# Altium footprint library Robot.PcbLib: 113 footprints (part 6 of 8)
Each footprint in its own frame and in the unit in brackets; x right, y up, seen from the top. Pads: shape width x height; smd on the part's side, far side on the other; paste and mask are expansions set on the pad; w line width, h text height; cw(c..) or ccw(c..) is an arc to the next point about the centre after c.
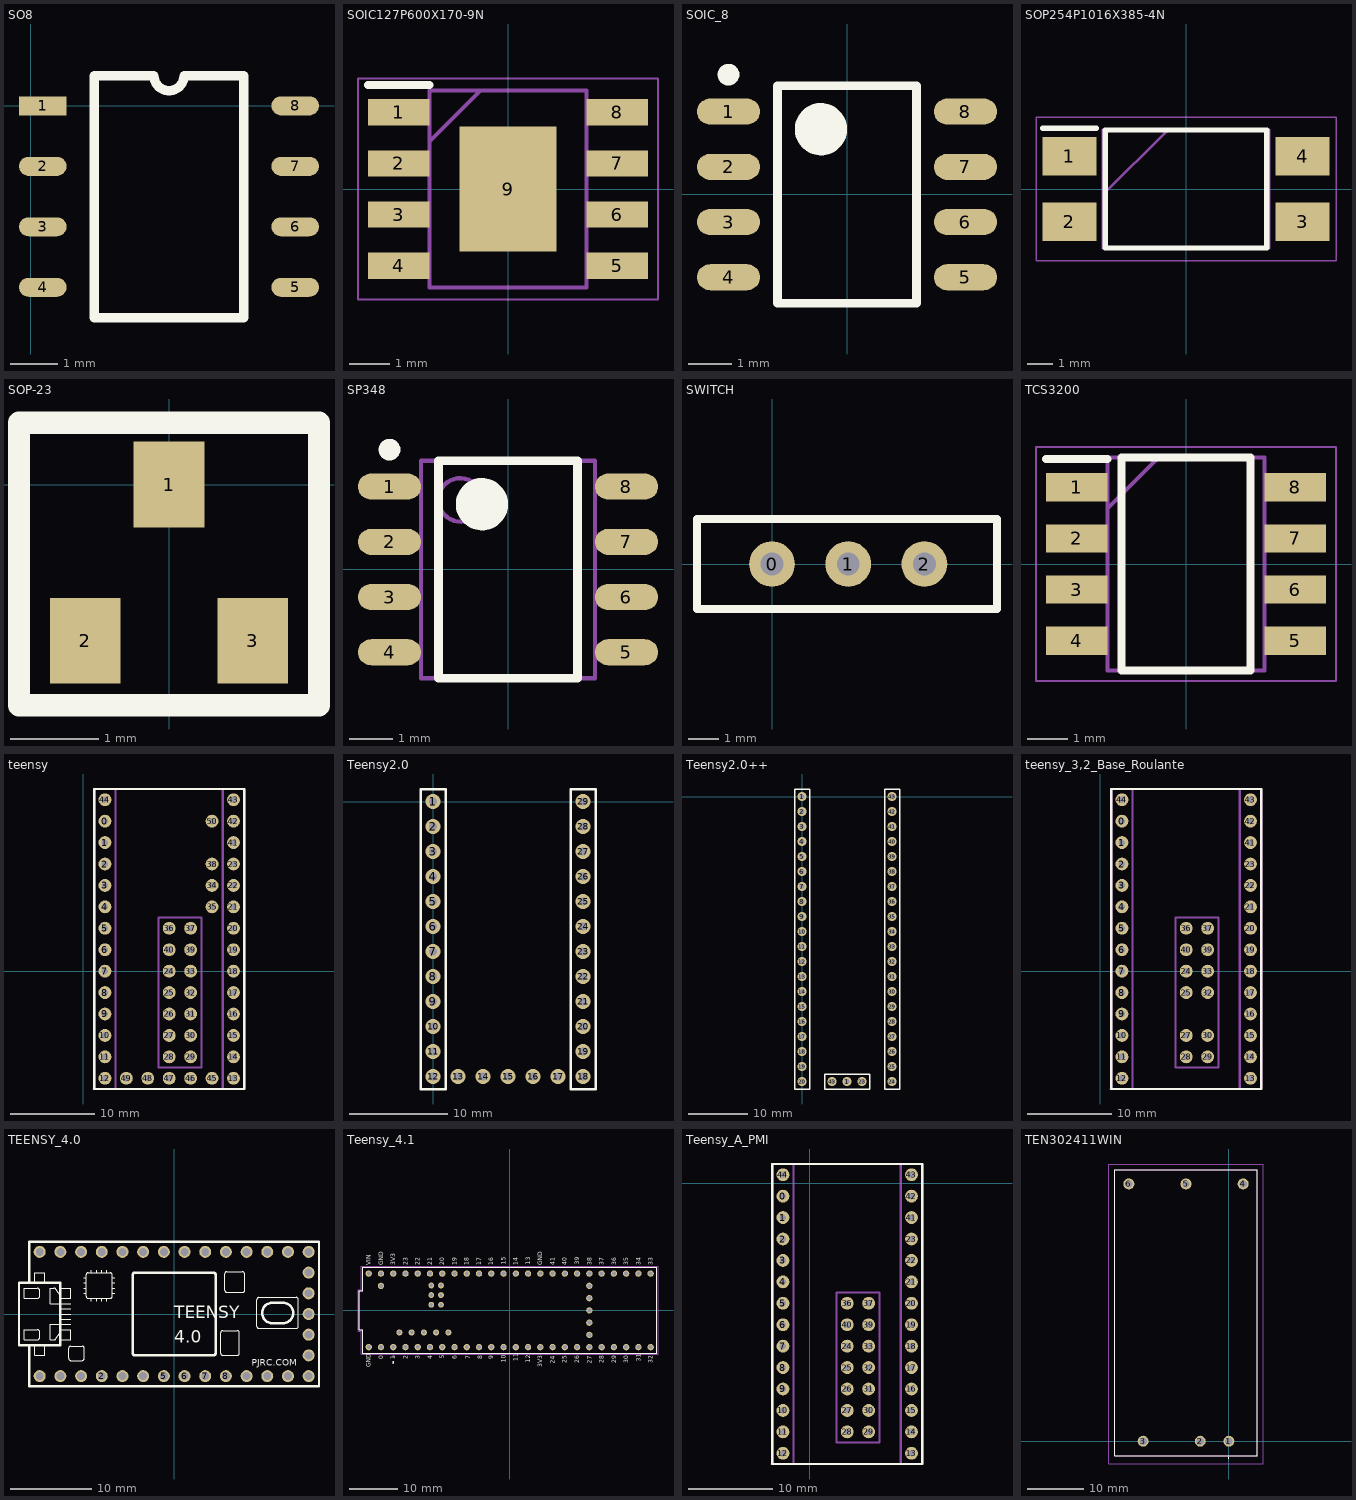
[diagram p5: the footprints below, top view; thin cyan lines are the x and y axes]

## SO8 [mm]
pads (8):
  rect 1x0.4 smd: 1(0.25,0)
  oval 1x0.4 smd: 2(0.25,-1.27) 3(0.25,-2.54) 4(0.25,-3.81) 5(5.55,-3.81) 6(5.55,-2.54) 7(5.55,-1.27) 8(5.55,0)
Top Overlay:
  lines w0.2: 1.335,-4.445 1.335,0.635 2.582,0.635 ccw(c2.9,0.635) 3.217,0.635 4.465,0.635 4.465,-4.445 1.335,-4.445

## SOIC127P600X170-9N [mm]
pads (9):
  rect 1.525x0.65 smd: 1(-2.712,1.905) 2(-2.712,0.635) 3(-2.712,-0.635) 4(-2.712,-1.905) 5(2.712,-1.905) 6(2.712,-0.635) 7(2.712,0.635) 8(2.712,1.905)
  rect 2.4x3.1 smd: 9(0,0)
Top Overlay:
  lines w0.2: -3.475,2.58 -1.95,2.58
Mechanical 13:
  lines w0.1: -1.95,1.18 -0.68,2.45 ; -1.95,-2.45 -1.95,2.45 1.95,2.45 1.95,-2.45 -1.95,-2.45
Mechanical 15:
  lines w0.05: -3.725,-2.75 -3.725,2.75 3.725,2.75 3.725,-2.75 -3.725,-2.75
3D body "DRV8871DDA.stp": height 1.57, standoff 0, extent -3,-2.45 3,2.45

## SOIC_8 [mm] "SOIC, 8-Leads, Body 4,90x3,90mm, Pitch 1,27mm, IPC Medium Density"
height 1.75
pads (8):
  oval 1.45x0.6 smd: 1(-2.725,1.905) 2(-2.725,0.635) 3(-2.725,-0.635) 4(-2.725,-1.905) 5(2.725,-1.905) 6(2.725,-0.635) 7(2.725,0.635) 8(2.725,1.905)
Top Overlay:
  circle w0.25: c-2.725,2.755 r0.125
  circle w0.6: c-0.6,1.5 r0.3
  lines w0.2: -1.6,-2.5 -1.6,2.5 1.6,2.5 1.6,-2.5 -1.6,-2.5
3D body: height 1.75, standoff 0.1, extent -2,-2.5 2,2.5

## SOP254P1016X385-4N [mm]
pads (4):
  rect 2.1x1.5 smd: 1(-4.55,1.27) 2(-4.55,-1.27) 3(4.55,-1.27) 4(4.55,1.27)
Top Overlay:
  lines w0.2: -5.6,2.37 -3.5,2.37 ; -3.15,-2.3 -3.15,2.3 3.15,2.3 3.15,-2.3 -3.15,-2.3
Mechanical 13:
  lines w0.1: -3.25,-0.24 -0.71,2.3 ; -3.25,-2.3 -3.25,2.3 3.25,2.3 3.25,-2.3 -3.25,-2.3
Mechanical 15:
  lines w0.05: -5.85,-2.8 -5.85,2.8 5.85,2.8 5.85,-2.8 -5.85,-2.8
3D body "FOD817S.stp": height 3.85, standoff 0, extent -5.08,-2.3 5.08,2.3

## SOP-23 [mm]
pads (3):
  rect 0.802x0.972 smd: 1(0,0) 2(-0.95,-1.77) 3(0.95,-1.77)
Top Overlay:
  lines w0.254: -1.7,-2.5 1.7,-2.5 1.7,0.7 -0.2,0.7 -1.7,0.7 -1.7,-2.5

## SP348 [mm] "SOIC, SP348 Transceiver"
height 1.75
pads (8):
  oval 1.45x0.6 smd: 1(-2.725,1.905) 2(-2.725,0.635) 3(-2.725,-0.635) 4(-2.725,-1.905) 5(2.725,-1.905) 6(2.725,-0.635) 7(2.725,0.635) 8(2.725,1.905)
Top Overlay:
  circle w0.6: c-0.6,1.5 r0.3
  circle w0.25: c-2.725,2.755 r0.125
  lines w0.2: -1.6,-2.5 1.6,-2.5 1.6,2.5 -1.6,2.5 -1.6,-2.5
Mechanical 13:
  circle w0.1: c-1.1,1.6 r0.5
  lines w0.1: -2,-2.5 2,-2.5 2,2.5 -2,2.5 -2,-2.5
3D body: height 1.75, standoff 0.1, extent -2,-2.5 2,2.5

## SWITCH [mil] "2 pos switch,  09.03290.01"
height 314.96
pads (3):
  round 60 hole 30: 0(0,0) 1(100,0) 2(200,0)
Top Overlay:
  lines w10: -98.43,-59.06 -98.43,59.06 295.28,59.06 295.28,-59.06 -98.43,-59.06
3D body: height 291.34, standoff 208.66, extent 0,-59.06 78.74,59.06
3D body: height 177.17, standoff 0, extent -98.43,-59.06 295.28,59.06
3D body: height 208.66, standoff 177.17, extent -98.43,-59.06 177.17,59.06

## TCS3200 [mm] "High-Resolution Conversion of Light Intensity to Frequency  Programmable Color and Full-Scale Output Frequency  Communicates Directly With a Microcontroller  Single-Supply Operation (2.7 V to 5.5 V)  Power Down Feature  Nonlinearity Error Typically 0.2% at 50 kHz"
pads (8):
  rect 1.525x0.7 smd: 1(-2.712,1.905) 2(-2.712,0.635) 3(-2.712,-0.635) 4(-2.712,-1.905) 5(2.712,-1.905) 6(2.712,-0.635) 7(2.712,0.635) 8(2.712,1.905)
Top Overlay:
  lines w0.2: -3.475,2.605 -1.95,2.605 ; -1.6,-2.65 -1.6,2.65 1.6,2.65 1.6,-2.65 -1.6,-2.65
Mechanical 15:
  lines w0.1: -1.95,1.38 -0.68,2.65 ; -1.95,-2.65 -1.95,2.65 1.95,2.65 1.95,-2.65 -1.95,-2.65
Mechanical 20:
  lines w0.05: -3.725,-2.9 -3.725,2.9 3.725,2.9 3.725,-2.9 -3.725,-2.9

## teensy [mil] "Teensy 3.2"
pads (51):
  round 60 hole 30: 0(100,700) 1(100,600) 2(100,500) 3(100,400) 4(100,300) 5(100,200) 6(100,100) 7(100,0) 8(100,-100) 9(100,-200) 10(100,-300) 11(100,-400) 12(100,-500) 13(700,-500) 14(700,-400) 15(700,-300) 16(700,-200) 17(700,-100) 18(700,0) 19(700,100) 20(700,200) 21(700,300) 22(700,400) 23(700,500) 24(400,0) 25(400,-100) 26(400,-200) 27(400,-300) 28(400,-400) 29(500,-400) 30(500,-300) 31(500,-200) 32(500,-100) 33(500,0) 34(600,400) 35(600,300) 36(400,200) 37(500,200) 38(600,500) 39(500,100) 40(400,100) 41(700,600) 42(700,700) 43(700,800) 44(100,800) 45(600,-500) 46(500,-500) 47(400,-500) 48(300,-500) 49(200,-500) 50(600,700)
Top Overlay:
  lines w10: 50,-550 50,850 750,850 750,-550 50,-550
Mechanical 1:
  lines w10: 48.14,-550 50,-548.14 50,850 150,850 150,-550 48.14,-550 ; 350,-450 350,250 550,250 550,-450 350,-450 ; 650,-550 650,850 750,850 750,-550 650,-550
3D body "Teensy_3-2.stp": height 504.76, standoff 253.15, extent 48.14,-550 751.86,906.68
3D body: height 331.89, standoff 0, extent 650.02,-549.98 749.98,849.98
3D body: height 331.89, standoff 0, extent 48.09,-550.02 150.02,850.02
3D body: height 331.89, standoff 0, extent 350.02,-449.98 549.98,249.98

## Teensy2.0 [mil] "Teensy2.0 with minimal"
pads (29):
  round 60 hole 31.5: 1(0,0) 2(0,-100) 3(0,-200) 4(0,-300) 5(0,-400) 6(0,-500) 7(0,-600) 8(0,-700) 9(0,-800) 10(0,-900) 11(0,-1000) 12(0,-1100) 13(100,-1100) 14(200,-1100) 15(300,-1100) 16(400,-1100) 17(500,-1100) 18(600,-1100) 19(600,-1000) 20(600,-900) 21(600,-800) 22(600,-700) 23(600,-600) 24(600,-500) 25(600,-400) 26(600,-300) 27(600,-200) 28(600,-100) 29(600,0)
Top Overlay:
  lines w10: -50,-1150 50,-1150 50,50 -50,50 -50,-1150 ; 550,-1150 550,50 650,50 650,-1150 550,-1150
3D body: height 255.91, standoff 0, extent -50,-1150 50,50
3D body: height 255.91, standoff 0, extent 550,-1150 650,50
3D body: height 255.91, standoff 0, extent 50,-1150 550,-1050

## Teensy2.0++ [mil]
pads (43):
  round 60 hole 31.5: 1(0,0) 1(300,-1900) 2(0,-100) 3(0,-200) 4(0,-300) 5(0,-400) 6(0,-500) 7(0,-600) 8(0,-700) 9(0,-800) 10(0,-900) 11(0,-1000) 12(0,-1100) 13(0,-1200) 14(0,-1300) 15(0,-1400) 16(0,-1500) 17(0,-1600) 18(0,-1700) 19(0,-1800) 20(0,-1900) 23(400,-1900) 24(600,-1900) 25(600,-1800) 26(600,-1700) 27(600,-1600) 28(600,-1500) 29(600,-1400) 30(600,-1300) 31(600,-1200) 32(600,-1100) 33(600,-1000) 34(600,-900) 35(600,-800) 36(600,-700) 37(600,-600) 38(600,-500) 39(600,-400) 40(600,-300) 41(600,-200) 42(600,-100) 43(200,-1900) 43(600,0)
Top Overlay:
  lines w10: -50,-1950 50,-1950 50,50 -50,50 -50,-1950 ; 150,-1950 150,-1850 450,-1850 450,-1950 150,-1950 ; 550,-1950 550,50 650,50 650,-1950 550,-1950
3D body: height 255.91, standoff 0, extent 150,-1950 450,-1850
3D body: height 255.91, standoff 0, extent 550,-1950 650,50
3D body: height 255.91, standoff 0, extent -50,-1950 50,50
3D body "Teensy++2.0.STEP": height 572.84, standoff 31.5, extent -50,-1951.97 650,51.97

## teensy_3,2_Base_Roulante [mil] "Teensy 3.2"
pads (40):
  round 60 hole 30: 0(100,700) 1(100,600) 2(100,500) 3(100,400) 4(100,300) 5(100,200) 6(100,100) 7(100,0) 8(100,-100) 9(100,-200) 10(100,-300) 11(100,-400) 12(100,-500) 13(700,-500) 14(700,-400) 15(700,-300) 16(700,-200) 17(700,-100) 18(700,0) 19(700,100) 20(700,200) 21(700,300) 22(700,400) 23(700,500) 24(400,0) 25(400,-100) 27(400,-300) 28(400,-400) 29(500,-400) 30(500,-300) 32(500,-100) 33(500,0) 36(400,200) 37(500,200) 39(500,100) 40(400,100) 41(700,600) 42(700,700) 43(700,800) 44(100,800)
Top Overlay:
  lines w10: 50,-550 50,850 750,850 750,-550 50,-550
Mechanical 1:
  lines w10: 48.14,-550 50,-548.14 50,850 150,850 150,-550 48.14,-550 ; 350,-450 350,250 550,250 550,-450 350,-450 ; 650,-550 650,850 750,850 750,-550 650,-550
3D body "Teensy_3-2.stp": height 504.76, standoff 253.15, extent 48.14,-550 751.86,906.68
3D body: height 331.89, standoff 0, extent 650.02,-549.98 749.98,849.98
3D body: height 331.89, standoff 0, extent 48.09,-550.02 150.02,850.02
3D body: height 331.89, standoff 0, extent 350.02,-449.98 549.98,249.98

## TEENSY_4.0 [mil]
pads (33):
  round 58 hole 38: 0/RX(-550,-300) 1/TX(-450,-300) 2(-350,-300) 3/CANTX(-250,-300) 3V3_LN(650,-100) 3V3_LO(-450,300) 4/CANRX(-150,-300) 5(-50,-300) 6(50,-300) 7(150,-300) 8(250,-300) 9/CS(350,-300) 10/CS(450,-300) 11/MOSI(550,-300) 12/MISO(650,-300) 13/SCK(650,300) 14/A0(550,300) 15/A1(450,300) 16/A2(350,300) 17/A3(250,300) 18/A4/SDA(150,300) 19/A5/SCL(50,300) 20/A6(-50,300) 21/A7(-150,300) 22/A8(-250,300) 23/A9(-350,300) GND(-650,-300) GND2(-550,300) GND3(650,0) ON/OFF(650,200) PROG(650,100) VBAT\(650,-200) VIN(-650,300)
Top Overlay:
  drawing of 151 lines, arcs and shapes, not listed
  text "TEENSY" at 1.25,-20 h60
  text "4.0" at 1.25,-140 h60
  text "PJRC.COM" at 375,-250 h32
3D body "step_temp.STEP": height 172.44, standoff -47.24, extent -727.56,-350 700,350

## Teensy_4.1 [mm]
height 4.07
pads (65):
  round 1.308 hole 0.8: 0(-26.67,-7.62) 1(-24.13,-7.62) 2(-21.59,-7.62) 3(-19.05,-7.62) 3.3V_1(6.35,-7.62) 3.3V_2(-24.13,7.62) 3.3V_3(16.51,-2.54) 4(-16.51,-7.62) 5(-13.97,-7.62) 6(-11.43,-7.62) 7(-8.89,-7.62) 8(-6.35,-7.62) 9(-3.81,-7.62) 10(-1.27,-7.62) 11(1.27,-7.62) 12(3.81,-7.62) 13(3.81,7.62) 14(1.27,7.62) 15(-1.27,7.62) 16(-3.81,7.62) 17(-6.35,7.62) 18(-8.89,7.62) 19(-11.43,7.62) 20(-13.97,7.62) 21(-16.51,7.62) 22(-19.05,7.62) 23(-21.59,7.62) 24(8.89,-7.62) 25(11.43,-7.62) 26(13.97,-7.62) 27(16.51,-7.62) 28(19.05,-7.62) 29(21.59,-7.62) 30(24.13,-7.62) 31(26.67,-7.62) 32(29.21,-7.62) 33(29.21,7.62) 34(26.67,7.62) 35(24.13,7.62) 36(21.59,7.62) 37(19.05,7.62) 38(16.51,7.62) 39(13.97,7.62) 40(11.43,7.62) 41(8.89,7.62) GND1(-29.21,-7.62) GND2(6.35,7.62) GND3(-26.67,7.62) GND4(16.51,0) ON/OFF(16.51,5.08) PROGRAM(16.51,2.54) VBAT(16.51,-5.08) VIN(-29.21,7.62) VUSB(-26.67,5.08)
  round 1.258 hole 0.75: 5V(-22.86,-4.57) D+(-17.78,-4.57) D-(-20.32,-4.57) USB_GND1(-15.24,-4.57) USB_GND2(-12.7,-4.57)
  round 1.208 hole 0.7: GND5(-14.24,3.17) LED(-16.24,3.17) RX+(-16.24,5.17) RX-(-14.24,5.17) TX+(-14.24,1.17) TX-(-16.24,1.17)
Top Overlay:
  circle w0.25: c-24.13,-10.795 r0.125
  lines w0.127: -31.18,-4.03 -30.48,-4.03 -30.48,-8.89 30.48,-8.89 30.48,8.89 -30.48,8.89 -30.48,4.03 -31.18,4.03 -31.18,-4.03
  text "32" at 29.655,-10.947 h0.89
  text "33" at 29.654,9.398 h0.89
  text "34" at 27.114,9.398 h0.89
  text "35" at 24.574,9.398 h0.89
  text "36" at 22.034,9.398 h0.89
  text "37" at 19.494,9.398 h0.89
  text "38" at 16.954,9.398 h0.89
  text "39" at 14.414,9.423 h0.89
  text "40" at 11.874,9.398 h0.89
  text "41" at 9.334,9.398 h0.89
  text "GND" at 6.794,9.398 h0.89
  text "13" at 4.254,9.423 h0.89
  text "14" at 1.714,9.398 h0.89
  text "15" at -0.826,9.423 h0.89
  text "16" at -3.366,9.398 h0.89
  text "17" at -5.906,9.398 h0.89
  text "18" at -8.446,9.398 h0.89
  text "19" at -10.986,9.398 h0.89
  text "20" at -13.526,9.373 h0.89
  text "21" at -16.066,9.398 h0.89
  text "22" at -18.606,9.398 h0.89
  text "23" at -21.146,9.398 h0.89
  text "3V3" at -23.686,9.373 h0.89
  text "GND" at -26.226,9.398 h0.89
  text "VIN" at -28.766,9.398 h0.89
  text "31" at 27.115,-10.642 h0.89
  text "30" at 24.575,-10.998 h0.89
  text "29" at 22.035,-10.973 h0.89
  text "28" at 19.495,-10.998 h0.89
  text "27" at 16.955,-11.023 h0.89
  text "26" at 14.415,-10.947 h0.89
  text "25" at 11.875,-10.998 h0.89
  text "24" at 9.335,-11.023 h0.89
  text "3V3" at 6.795,-11.785 h0.89
  text "10" at -0.838,-10.871 h0.89
  text "9" at -3.378,-10.16 h0.89
  text "8" at -5.714,-10.16 h0.89
  text "7" at -8.127,-10.16 h0.89
  text "6" at -10.985,-10.16 h0.89
  text "4" at -16.078,-10.16 h0.89
  text "3" at -18.618,-10.16 h0.89
  text "2" at -21.158,-10.16 h0.89
  text "1" at -23.698,-10.16 h0.89
  text "0" at -26.238,-10.16 h0.89
  text "GND" at -28.778,-11.811 h0.89
  text "5" at -13.525,-10.033 h0.89
  text "11" at 1.715,-10.49 h0.89
  text "12" at 4.255,-10.871 h0.89
Bottom Overlay:
  text "TX+" at -10.922,0.726 h0.89
  text "RX-" at -10.82,4.726 h0.89
  text "GND" at -10.897,2.726 h0.89
  text "GND" at -28.765,-4.267 h0.89
  text "32" at 29.655,-5.131 h0.89
  text "31" at 27.115,-5.334 h0.89
  text "30" at 24.575,-5.181 h0.89
  text "29" at 22.035,-5.207 h0.89
  text "VBAT" at 15.469,-5.524 h0.89
  text "5V" at -22.415,-2.032 h0.89
  text "D-" at -19.875,-1.956 h0.89
  text "D+" at -17.335,-1.956 h0.89
  text "GND" at -14.795,-1.245 h0.89
  text "GND" at -12.255,-1.219 h0.89
  text "3V3" at 15.494,-2.984 h0.89
  text "GND" at 15.469,-0.444 h0.89
  text "PROG" at 15.494,2.096 h0.89
  text "ON/OFF" at 15.494,4.699 h0.89
  text "RX+" at -17.348,4.726 h0.89
  text "LED" at -17.348,2.726 h0.89
  text "TX-" at -17.348,0.726 h0.89
  text "VUSB" at -26.226,4.013 h0.89
  text "0" at -26.225,-5.969 h0.89
  text "2" at -21.145,-5.994 h0.89
  text "6" at -10.985,-6.02 h0.89
  text "8" at -5.905,-5.969 h0.89
  text "7" at -8.445,-5.969 h0.89
  text "9" at -3.365,-5.994 h0.89
  text "3" at -18.605,-5.944 h0.89
  text "4" at -16.065,-5.886 h0.89
  text "5" at -13.525,-5.969 h0.89
  text "10" at -0.825,-5.309 h0.89
  text "11" at 1.715,-5.41 h0.89
  text "3V3" at 6.795,-4.369 h0.89
  text "12" at 4.255,-5.308 h0.89
  text "25" at 11.875,-5.181 h0.89
  text "24" at 9.335,-5.156 h0.89
  text "1" at -23.685,-6.121 h0.89
  text "28" at 19.495,-5.105 h0.89
  text "37" at 19.494,6.502 h0.89
  text "36" at 22.034,6.502 h0.89
  text "35" at 24.574,6.528 h0.89
  text "34" at 27.114,6.502 h0.89
  text "33" at 29.654,6.528 h0.89
  text "15" at -0.825,6.528 h0.89
  text "16" at -3.366,6.528 h0.89
  text "13" at 4.254,6.528 h0.89
  text "18" at -8.445,6.528 h0.89
  text "17" at -5.905,6.528 h0.89
  text "41" at 9.334,6.477 h0.89
  text "14" at 1.714,6.528 h0.89
  text "GND" at 6.794,6.35 h0.89
  text "23" at -21.145,6.528 h0.89
  text "3V3" at -23.685,6.553 h0.89
  text "VIN" at -28.765,6.502 h0.89
Top Courtyard:
  lines w0.05: -31.43,-4.28 -30.73,-4.28 -30.73,-9.14 30.73,-9.14 30.73,9.14 -30.73,9.14 -30.73,4.28 -31.43,4.28 -31.43,-4.28
Top 3D Body:
  lines w0.127: -31.18,-4.03 -30.48,-4.03 -30.48,-8.89 30.48,-8.89 30.48,8.89 -30.48,8.89 -30.48,4.03 -31.18,4.03 -31.18,-4.03
  text "Teensy 4.1" at -0.25,0.34 h1.27
Top Assembly:
  circle w0.25: c-24.13,-9.525 r0.125
3D body "step_temp.STEP": height 7.15, standoff -6.7, extent -31.18,-8.89 30.48,8.89

## Teensy_A_PMI [mil]
pads (42):
  round 60 hole 30: 0(-124.41,-59.84) 1(-124.41,-159.84) 2(-124.41,-259.84) 3(-124.41,-359.84) 4(-124.41,-459.84) 5(-124.41,-559.84) 6(-124.41,-659.84) 7(-124.41,-759.84) 8(-124.41,-859.84) 9(-124.41,-959.84) 10(-124.41,-1059.84) 11(-124.41,-1159.84) 12(-124.41,-1259.84) 13(475.59,-1259.84) 14(475.59,-1159.84) 15(475.59,-1059.84) 16(475.59,-959.84) 17(475.59,-859.84) 18(475.59,-759.84) 19(475.59,-659.84) 20(475.59,-559.84) 21(475.59,-459.84) 22(475.59,-359.84) 23(475.59,-259.84) 24(175.59,-759.84) 25(175.59,-859.84) 26(175.59,-959.84) 27(175.59,-1059.84) 28(175.59,-1159.84) 29(275.59,-1159.84) 30(275.59,-1059.84) 31(275.59,-959.84) 32(275.59,-859.84) 33(275.59,-759.84) 36(175.59,-559.84) 37(275.59,-559.84) 39(275.59,-659.84) 40(175.59,-659.84) 41(475.59,-159.84) 42(475.59,-59.84) 43(475.59,40.16) 44(-124.41,40.16)
Top Overlay:
  lines w10: -174.41,-1309.84 -174.41,90.16 525.59,90.16 525.59,-1309.84 -174.41,-1309.84
Mechanical 1:
  lines w10: -176.27,-1309.84 -174.41,-1307.98 -174.41,90.16 -74.41,90.16 -74.41,-1309.84 -176.27,-1309.84 ; 125.59,-1209.84 125.59,-509.84 325.59,-509.84 325.59,-1209.84 125.59,-1209.84 ; 425.59,-1309.84 425.59,90.16 525.59,90.16 525.59,-1309.84 425.59,-1309.84
3D body "Teensy_3-2.stp": height 504.76, standoff 253.15, extent -176.27,-1309.84 527.45,146.83
3D body: height 331.89, standoff 0, extent 425.61,-1309.82 525.57,90.14
3D body: height 331.89, standoff 0, extent -176.32,-1309.86 -74.39,90.18
3D body: height 331.89, standoff 0, extent 125.61,-1209.82 325.57,-509.86

## TEN302411WIN [mm]
pads (6):
  round 1.95 hole 1.3: 1(0,0) 2(-5.08,0) 3(-15.24,0) 4(2.54,45.72) 5(-7.62,45.72) 6(-17.78,45.72)
Top Overlay:
  lines w0.1: -20.32,-2.54 -20.32,48.26 5.08,48.26 5.08,-2.54 -20.32,-2.54 ; -0.1,-3 ccw(c-0.05,-3) 0,-3 ccw(c-0.05,-3) -0.1,-3
Mechanical 13:
  lines w0.2: -20.32,-2.54 -20.32,48.26 5.08,48.26 5.08,-2.54 -20.32,-2.54
Mechanical 15:
  lines w0.1: -21.32,-4.05 -21.32,49.26 6.08,49.26 6.08,-4.05 -21.32,-4.05
3D body "TEN_30-2411WIN.stp": height 11.03, standoff -4.77, extent -20.32,-2.79 5.08,48.01